# Altium footprint library FootPrintLib_9.PcbLib: 287 footprints (part 12 of 18)
Each footprint in its own frame and in the unit in brackets; x right, y up, seen from the top. Pads: shape width x height; smd on the part's side, far side on the other; paste and mask are expansions set on the pad; w line width, h text height; cw(c..) or ccw(c..) is an arc to the next point about the centre after c.
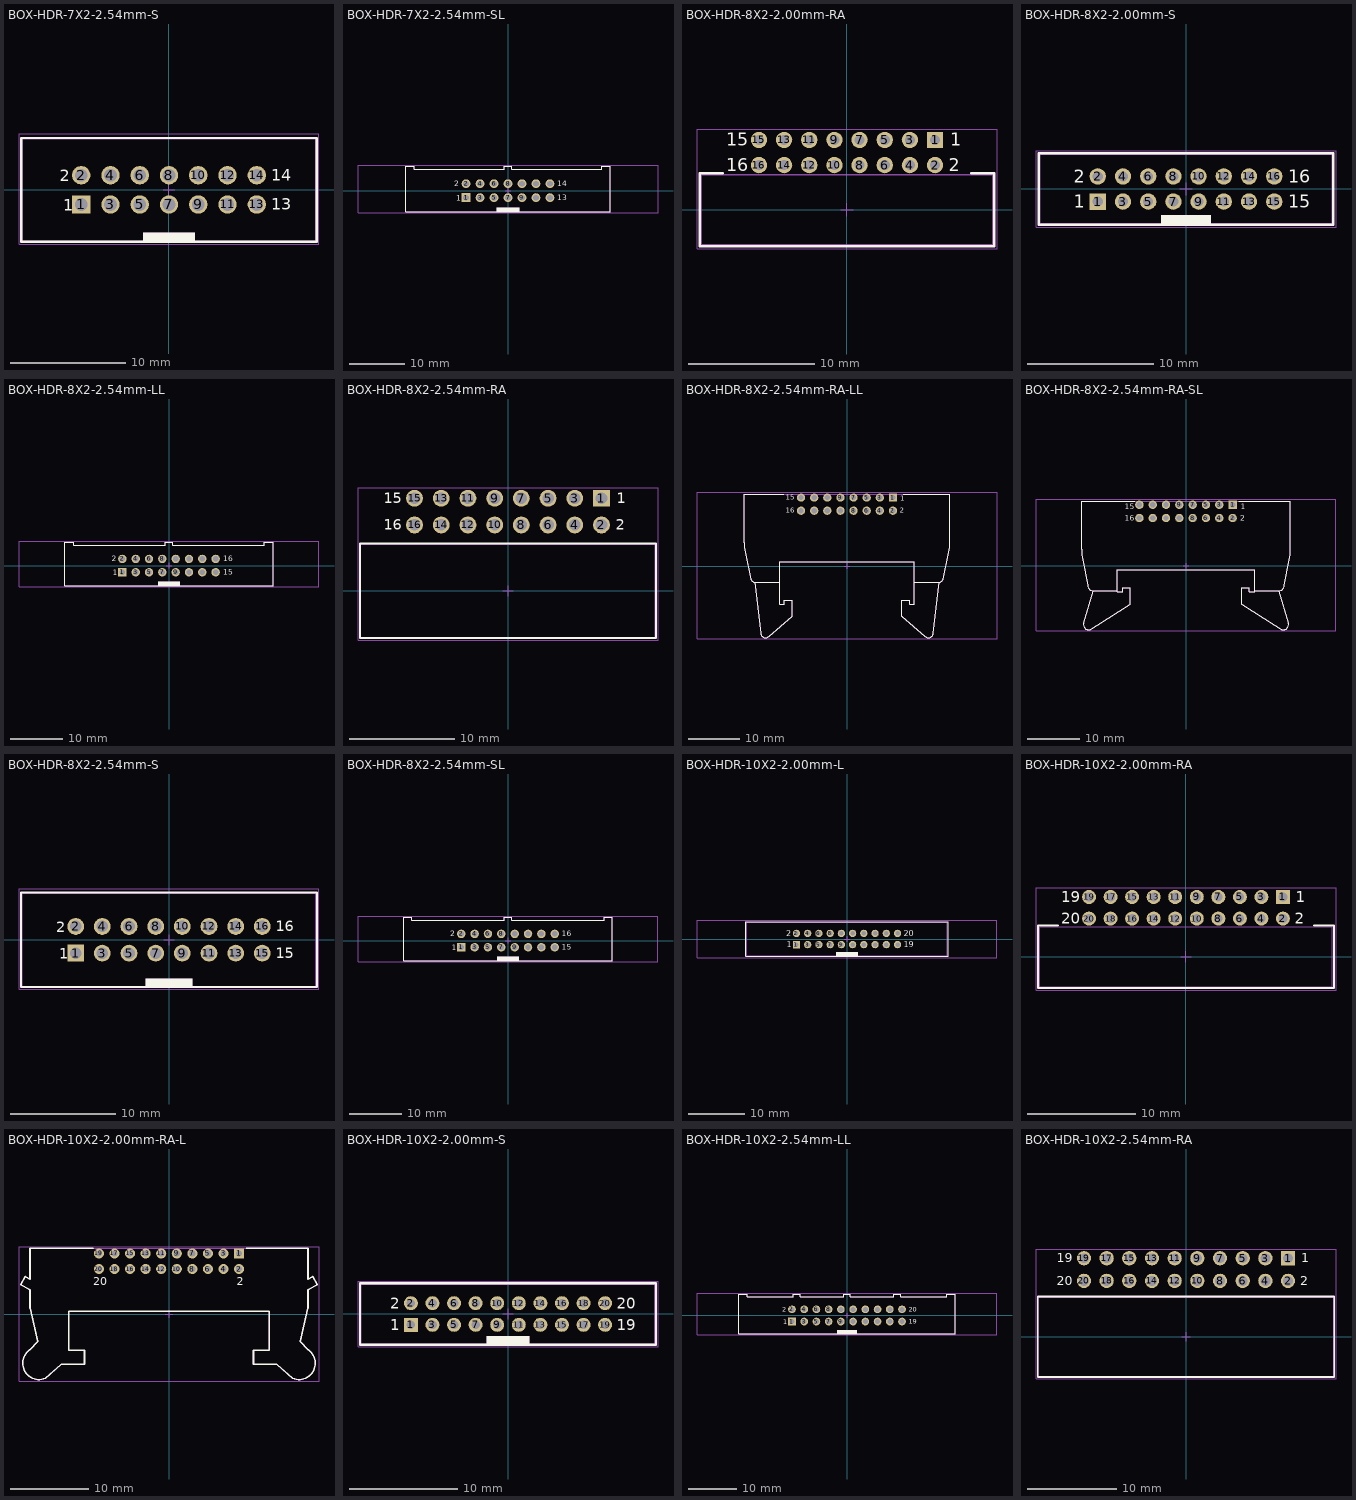
[diagram p11: the footprints below, top view; thin cyan lines are the x and y axes]

## BOX-HDR-7X2-2.54mm-S [mm] "14 pins, straight, gold plating"
height 9.1
pads (14):
  rect 1.6x1.6 hole 1.1: 1(-7.62,-1.27)
  round 1.6 hole 1.1: 2(-7.62,1.27) 3(-5.08,-1.27) 4(-5.08,1.27) 5(-2.54,-1.27) 6(-2.54,1.27) 7(0,-1.27) 8(0,1.27) 9(2.54,-1.27) 10(2.54,1.27) 11(5.08,-1.27) 12(5.08,1.27) 13(7.62,-1.27) 14(7.62,1.27)
Top Overlay:
  rectangle: -2.25,-4.5 2.25,-3.7
  lines w0.2: -12.82,-4.5 -12.82,4.5 12.82,4.5 12.82,-4.5 -12.82,-4.5
  text "14" at 8.88,0.8 h1.02
  text "13" at 8.88,-1.74 h1.02
  text "2" at -9.48,0.74 h1.02
  text "1" at -9.18,-1.8 h1.02
Mechanical 13:
  rectangle: -2.25,-4.425 2.25,-3.7
  lines w0.1: -12.72,-4.425 12.72,-4.425 12.72,4.425 -12.72,4.425 -12.72,-4.425
Mechanical 15:
  lines w0.05: -0.5,0 0.5,0 ; 0,-0.5 0,0.5 ; -13.02,-4.7 -13.02,4.85 13.02,4.85 13.02,-4.7 -13.02,-4.7
3D body "61201421621.stp": height 9.13, standoff -2.98, extent -12.72,-4.425 12.72,4.75

## BOX-HDR-7X2-2.54mm-SL [mm] "14 pins, straight, short lever, gold plating"
height 24.5
pads (14):
  rect 1.6x1.6 hole 1.02: 1(-7.62,-1.27)
  round 1.6 hole 1.02: 2(-7.62,1.27) 3(-5.08,-1.27) 4(-5.08,1.27) 5(-2.54,-1.27) 6(-2.54,1.27) 7(0,-1.27) 8(0,1.27) 9(2.54,-1.27) 10(2.54,1.27) 11(5.08,-1.27) 12(5.08,1.27) 13(7.62,-1.27) 14(7.62,1.27)
Top Overlay:
  rectangle: -2.1,-3.85 2.1,-3.05
  lines w0.2: -0.7,4.45 0.7,4.45 0.7,3.85 16.99,3.85 16.99,4.45 18.54,4.45 18.54,-3.85 -18.54,-3.85 -18.54,4.45 -16.99,4.45 -16.99,3.85 -0.7,3.85 -0.7,4.45 ; -0.7,4.45 -0.7,4.45
  text "14" at 8.94,0.8 h1.02
  text "13" at 8.94,-1.74 h1.02
  text "1" at -9.44,-1.8 h1.02
  text "2" at -9.74,0.8 h1.02
Mechanical 13:
  rectangle: -2.1,-3.85 2.1,-3.05
  lines w0.1: -0.7,4.45 -0.7,3.85 -16.99,3.85 -16.99,4.45 -18.54,4.45 -18.54,-3.85 18.54,-3.85 18.54,4.45 16.99,4.45 16.99,3.85 0.7,3.85 0.7,4.45 -0.7,4.45 ; -0.7,4.45 -0.7,4.45
Mechanical 15:
  lines w0.05: -0.5,0 0.5,0 ; 0,-0.5 0,0.5 ; -27.24,-4.05 27.24,-4.05 27.24,4.65 -27.24,4.65 -27.24,-4.05
3D body "61201422021.stp": height 24.55, standoff -3.35, extent -18.64,-3.85 18.641,4.45

## BOX-HDR-8X2-2.00mm-RA [mm] "2.00mm Male Angled Box Header, 16p"
height 5.4
pads (16):
  rect 1.3x1.3 hole 0.8: 1(7,5.55)
  round 1.3 hole 0.8: 2(7,3.55) 3(5,5.55) 4(5,3.55) 5(3,5.55) 6(3,3.55) 7(1,5.55) 8(1,3.55) 9(-1,5.55) 10(-1,3.55) 11(-3,5.55) 12(-3,3.55) 13(-5,5.55) 14(-5,3.55) 15(-7,5.55) 16(-7,3.55)
Top Overlay:
  lines w0.2: -9.875,2.9 -11.725,2.9 -11.725,-2.9 11.725,-2.9 11.725,2.9 9.875,2.9
  text "1" at 8.2,5.075 h1.02
  text "2" at 8.1,3.075 h1.02
  text "15" at -9.6,5.075 h1.02
  text "16" at -9.6,3.075 h1.02
Mechanical 13:
  lines w0.1: -11.6,-2.8 -11.6,2.8 11.6,2.8 11.6,-2.8 -11.6,-2.8
Mechanical 15:
  lines w0.05: -0.5,0 0.5,0 ; 0,-0.5 0,0.5 ; -11.925,-3.1 -11.925,6.4 11.925,6.4 11.925,-3.1 -11.925,-3.1
3D body "62501621721 (rev1).stp": height 5.5, standoff -2.85, extent -11.6,-2.8 11.6,5.8

## BOX-HDR-8X2-2.00mm-S [mm] "2.00mm Male Box Header, 16p"
height 5.6
pads (16):
  rect 1.3x1.3 hole 0.8: 1(-7,-1)
  round 1.3 hole 0.8: 2(-7,1) 3(-5,-1) 4(-5,1) 5(-3,-1) 6(-3,1) 7(-1,-1) 8(-1,1) 9(1,-1) 10(1,1) 11(3,-1) 12(3,1) 13(5,-1) 14(5,1) 15(7,-1) 16(7,1)
Top Overlay:
  rectangle: -2,-2.85 2,-2.05
  lines w0.2: -11.7,-2.85 11.7,-2.85 11.7,2.85 -11.7,2.85 -11.7,-2.85
  text "16" at 8.1,0.5 h1.02
  text "15" at 8.1,-1.5 h1.02
  text "1" at -8.9,-1.5 h1.02
  text "2" at -8.9,0.5 h1.02
Mechanical 13:
  rectangle: -2,-2.75 2,-2.05
  lines w0.1: -11.6,-2.75 -11.6,2.75 11.6,2.75 11.6,-2.75 -11.6,-2.75
Mechanical 15:
  lines w0.05: -0.5,0 0.5,0 ; 0,-0.5 0,0.5 ; -11.9,-3.05 -11.9,3.05 11.9,3.05 11.9,-3.05 -11.9,-3.05
3D body "62501621621.stp": height 5.65, standoff -2.5, extent -11.6,-2.75 11.6,2.75

## BOX-HDR-8X2-2.54mm-LL [mm] "16 pins, straight, long lever, gold plating"
height 28
pads (16):
  rect 1.6x1.6 hole 1.02: 1(-8.89,-1.27)
  round 1.6 hole 1.02: 2(-8.89,1.27) 3(-6.35,-1.27) 4(-6.35,1.27) 5(-3.81,-1.27) 6(-3.81,1.27) 7(-1.27,-1.27) 8(-1.27,1.27) 9(1.27,-1.27) 10(1.27,1.27) 11(3.81,-1.27) 12(3.81,1.27) 13(6.35,-1.27) 14(6.35,1.27) 15(8.89,-1.27) 16(8.89,1.27)
Top Overlay:
  rectangle: -2.1,-3.85 2.1,-3.04
  lines w0.2: -19.91,-3.85 19.91,-3.85 19.91,4.45 18.18,4.45 18.18,3.85 0.7,3.85 0.7,4.45 -0.7,4.45 -0.7,3.85 -18.18,3.85 -18.18,4.45 -19.91,4.45 -19.91,-3.85
  text "16" at 10.31,0.8 h1.02
  text "15" at 10.31,-1.74 h1.02
  text "1" at -10.71,-1.8 h1.02
  text "2" at -10.91,0.8 h1.02
Mechanical 13:
  rectangle: -2.1,-3.85 2.1,-3.04
  lines w0.1: -19.91,-3.85 -19.91,4.45 -18.18,4.45 -18.18,3.85 -0.7,3.85 -0.7,4.45 0.7,4.45 0.7,3.85 18.18,3.85 18.18,4.45 19.91,4.45 19.91,-3.85 -19.91,-3.85
Mechanical 15:
  lines w0.05: -0.5,0 0.5,0 ; 0,-0.5 0,0.5 ; -28.61,-4.05 28.61,-4.05 28.61,4.65 -28.61,4.65 -28.61,-4.05
3D body "61201622821 (rev1).stp": height 27.84, standoff -3.35, extent -19.91,-3.86 19.91,4.45

## BOX-HDR-8X2-2.54mm-RA [mm] "16 pins, right angled, gold plating"
height 9.1
pads (16):
  rect 1.6x1.6 hole 1.1: 1(8.89,8.805)
  round 1.6 hole 1.1: 2(8.89,6.265) 3(6.35,8.805) 4(6.35,6.265) 5(3.81,8.805) 6(3.81,6.265) 7(1.27,8.805) 8(1.27,6.265) 9(-1.27,8.805) 10(-1.27,6.265) 11(-3.81,8.805) 12(-3.81,6.265) 13(-6.35,8.805) 14(-6.35,6.265) 15(-8.89,8.805) 16(-8.89,6.265)
Top Overlay:
  lines w0.2: -14.065,-4.5 14.065,-4.5 14.065,4.5 -14.065,4.5 -14.065,-4.5
  text "16" at -11.81,5.8 h1.02
  text "15" at -11.81,8.34 h1.02
  text "1" at 10.35,8.34 h1.02
  text "2" at 10.25,5.8 h1.02
Mechanical 13:
  lines w0.1: -13.99,-4.425 13.99,-4.425 13.99,4.425 -13.99,4.425 -13.99,-4.425
Mechanical 15:
  lines w0.05: -0.5,0 0.5,0 ; 0,-0.5 0,0.5 ; -14.265,-4.7 -14.265,9.805 14.265,9.805 14.265,-4.7 -14.265,-4.7
3D body "61201621721.stp": height 9.23, standoff -2.88, extent -13.99,-4.425 13.99,9.125

## BOX-HDR-8X2-2.54mm-RA-LL [mm] "16 pins, right angeled, long lever, gold plating"
height 10.8
pads (16):
  rect 1.6x1.6 hole 1.02: 1(8.89,13.23)
  round 1.6 hole 1.02: 2(8.89,10.69) 3(6.35,13.23) 4(6.35,10.69) 5(3.81,13.23) 6(3.81,10.69) 7(1.27,13.23) 8(1.27,10.69) 9(-1.27,13.23) 10(-1.27,10.69) 11(-3.81,13.23) 12(-3.81,10.69) 13(-6.35,13.23) 14(-6.35,10.69) 15(-8.89,13.23) 16(-8.89,10.69)
Top Overlay:
  lines w0.2: -19.91,4.54 -19.91,13.85 -12.21,13.85 ; -19.905,4.54 ccw(c-9.91,4.84) -19.664,2.636 -18.619,-2.534 ; -18.613,-2.533 ccw(c-17.69,-2.15) -17.69,-3.15 -13.01,-3.15 ; -17.874,-3.15 -16.728,-13.022 ccw(c-15.74,-12.87) -15.082,-13.623 -10.611,-9.758 ; -10.61,-9.76 -10.61,-6.66 -12.11,-6.66 -12.11,-7.37 -13.01,-7.37 -13.01,0.85 13.01,0.85 13.01,-7.37 12.11,-7.37 12.11,-6.66 10.61,-6.66 10.61,-9.76 ; 10.611,-9.758 15.083,-13.623 ccw(c15.74,-12.87) 16.728,-13.022 17.874,-3.15 ; 10.86,13.85 19.91,13.85 19.91,4.54 ; 13.01,-3.15 17.69,-3.15 ccw(c17.69,-2.15) 18.614,-2.533 ; 18.619,-2.534 19.664,2.636 ccw(c9.91,4.84) 19.906,4.54
  text "1" at 10.31,12.66 h1.02
  text "2" at 10.21,10.26 h1.02
  text "16" at -11.81,10.26 h1.02
  text "15" at -11.81,12.8 h1.02
Mechanical 13:
  lines w0.1: -19.91,4.54 -19.91,13.85 19.91,13.85 19.91,4.54 ; -19.905,4.54 ccw(c-9.91,4.84) -19.664,2.636 -18.619,-2.534 ; -18.613,-2.533 ccw(c-17.69,-2.15) -17.69,-3.15 -13.01,-3.15 ; -17.874,-3.15 -16.728,-13.022 ccw(c-15.74,-12.87) -15.082,-13.623 -10.611,-9.758 ; -10.61,-9.76 -10.61,-6.66 -12.11,-6.66 -12.11,-7.37 -13.01,-7.37 -13.01,0.85 13.01,0.85 13.01,-7.37 12.11,-7.37 12.11,-6.66 10.61,-6.66 10.61,-9.76 ; 10.611,-9.758 15.083,-13.623 ccw(c15.74,-12.87) 16.728,-13.022 17.874,-3.15 ; 13.01,-3.15 17.69,-3.15 ccw(c17.69,-2.15) 18.614,-2.533 ; 18.619,-2.534 19.664,2.636 ccw(c9.91,4.84) 19.906,4.54
Mechanical 15:
  lines w0.05: -0.5,0 0.5,0 ; 0,-0.5 0,0.5 ; -29.01,-14.06 -29.01,14.23 29.01,14.23 29.01,-14.06 -29.01,-14.06
3D body "61201622921 (rev1).stp": height 8.35, standoff -2.35, extent -19.91,-13.871 19.91,13.85

## BOX-HDR-8X2-2.54mm-RA-SL [mm] "16 pins, right angeled, short lever, gold plating"
height 8.3
pads (16):
  rect 1.6x1.6 hole 1.02: 1(8.89,11.63)
  round 1.6 hole 1.02: 2(8.89,9.09) 3(6.35,11.63) 4(6.35,9.09) 5(3.81,11.63) 6(3.81,9.09) 7(1.27,11.63) 8(1.27,9.09) 9(-1.27,11.63) 10(-1.27,9.09) 11(-3.81,11.63) 12(-3.81,9.09) 13(-6.35,11.63) 14(-6.35,9.09) 15(-8.89,11.63) 16(-8.89,9.09)
Top Overlay:
  lines w0.2: -18.774,-3.751 -19.716,1.138 cw(c-9.91,3.1) -19.91,3.1 -19.91,12.25 -9.81,12.25 ; -18.77,-3.75 ccw(c-17.77,-3.75) -17.77,-4.75 ; -17.865,-4.75 -13.11,-4.75 ; -17.684,-4.851 -19.517,-10.941 ccw(c-18.56,-11.23) -18.01,-12.066 -10.61,-7.33 -10.61,-4.23 -12.11,-4.23 -12.11,-4.94 -13.11,-4.94 -13.11,-0.75 13.11,-0.75 13.11,-4.94 12.11,-4.94 12.11,-4.23 10.61,-4.23 10.61,-7.33 18.01,-12.067 ccw(c18.56,-11.23) 19.517,-10.941 17.684,-4.851 ; 10.06,12.25 19.91,12.25 19.91,3.1 cw(c9.91,3.1) 19.716,1.138 18.774,-3.751 ; 13.11,-4.75 17.865,-4.75 ; 17.77,-4.75 ccw(c17.77,-3.75) 18.77,-3.75
  text "2" at 10.31,8.6 h1.02
  text "1" at 10.41,10.8 h1.02
  text "16" at -11.71,8.6 h1.02
  text "15" at -11.71,10.8 h1.02
Mechanical 13:
  lines w0.1: -18.774,-3.751 -19.716,1.138 cw(c-9.91,3.1) -19.91,3.1 -19.91,12.25 19.91,12.25 19.91,3.1 cw(c9.91,3.1) 19.716,1.138 18.774,-3.751 ; -18.77,-3.75 ccw(c-17.77,-3.75) -17.77,-4.75 ; -17.865,-4.75 -13.11,-4.75 ; -17.684,-4.851 -19.517,-10.941 ccw(c-18.56,-11.23) -18.01,-12.066 -10.61,-7.33 -10.61,-4.23 -12.11,-4.23 -12.11,-4.94 -13.11,-4.94 -13.11,-0.75 13.11,-0.75 13.11,-4.94 12.11,-4.94 12.11,-4.23 10.61,-4.23 10.61,-7.33 18.01,-12.067 ccw(c18.56,-11.23) 19.517,-10.941 17.684,-4.851 ; 13.11,-4.75 17.865,-4.75 ; 17.77,-4.75 ccw(c17.77,-3.75) 18.77,-3.75
Mechanical 15:
  lines w0.05: -0.5,0 0.5,0 ; 0,-0.5 0,0.5 ; -28.61,-12.45 28.61,-12.45 28.61,12.63 -28.61,12.63 -28.61,-12.45
3D body "61201622121.stp": height 8.35, standoff -3.35, extent -19.91,-12.25 19.91,12.25

## BOX-HDR-8X2-2.54mm-S [mm] "16 pins, straight, gold plating"
height 9.1
pads (16):
  rect 1.6x1.6 hole 1.1: 1(-8.89,-1.27)
  round 1.6 hole 1.1: 2(-8.89,1.27) 3(-6.35,-1.27) 4(-6.35,1.27) 5(-3.81,-1.27) 6(-3.81,1.27) 7(-1.27,-1.27) 8(-1.27,1.27) 9(1.27,-1.27) 10(1.27,1.27) 11(3.81,-1.27) 12(3.81,1.27) 13(6.35,-1.27) 14(6.35,1.27) 15(8.89,-1.27) 16(8.89,1.27)
Top Overlay:
  rectangle: -2.25,-4.5 2.25,-3.7
  lines w0.2: -14.09,-4.5 14.09,-4.5 14.09,4.5 -14.09,4.5 -14.09,-4.5
  text "1" at -10.45,-1.8 h1.02
  text "2" at -10.75,0.74 h1.02
  text "16" at 10.15,0.8 h1.02
  text "15" at 10.15,-1.74 h1.02
Mechanical 13:
  rectangle: -2.25,-4.425 2.25,-3.7
  lines w0.1: -13.99,-4.425 -13.99,4.425 13.99,4.425 13.99,-4.425 -13.99,-4.425
Mechanical 15:
  lines w0.05: -0.5,0 0.5,0 ; 0,-0.5 0,0.5 ; -14.29,-4.7 14.29,-4.7 14.29,4.85 -14.29,4.85 -14.29,-4.7
3D body "61201621621.stp": height 9.13, standoff -2.98, extent -13.99,-4.425 13.99,4.75

## BOX-HDR-8X2-2.54mm-SL [mm] "16 pins, straight, short lever, gold plating"
height 24.5
pads (16):
  rect 1.6x1.6 hole 1.02: 1(-8.89,-1.27)
  round 1.6 hole 1.02: 2(-8.89,1.27) 3(-6.35,-1.27) 4(-6.35,1.27) 5(-3.81,-1.27) 6(-3.81,1.27) 7(-1.27,-1.27) 8(-1.27,1.27) 9(1.27,-1.27) 10(1.27,1.27) 11(3.81,-1.27) 12(3.81,1.27) 13(6.35,-1.27) 14(6.35,1.27) 15(8.89,-1.27) 16(8.89,1.27)
Top Overlay:
  rectangle: -2.1,-3.85 2.1,-3.05
  lines w0.2: -0.7,4.45 -0.7,3.85 -18.26,3.85 -18.26,4.45 -19.81,4.45 -19.81,-3.85 19.81,-3.85 19.81,4.45 18.26,4.45 18.26,3.85 0.7,3.85 0.7,4.45 -0.7,4.45 ; -0.7,4.45 -0.7,4.45
  text "1" at -10.71,-1.8 h1.02
  text "2" at -11.01,0.8 h1.02
  text "15" at 10.21,-1.74 h1.02
  text "16" at 10.21,0.8 h1.02
Mechanical 13:
  rectangle: -2.1,-3.85 2.1,-3.05
  lines w0.1: -0.7,4.45 0.7,4.45 0.7,3.85 18.26,3.85 18.26,4.45 19.81,4.45 19.81,-3.85 -19.81,-3.85 -19.81,4.45 -18.26,4.45 -18.26,3.85 -0.7,3.85 -0.7,4.45 ; -0.7,4.45 -0.7,4.45
Mechanical 15:
  lines w0.05: -0.5,0 0.5,0 ; 0,-0.5 0,0.5 ; -28.51,-4.05 28.51,-4.05 28.51,4.65 -28.51,4.65 -28.51,-4.05
3D body "61201622021.stp": height 24.55, standoff -3.35, extent -19.91,-3.85 19.911,4.45

## BOX-HDR-10X2-2.00mm-L [mm] "2.00mm Male Box Header with Lever, 20p"
height 16.85
pads (20):
  rect 1.3x1.3 hole 0.8: 1(-9,-1)
  round 1.3 hole 0.8: 2(-9,1) 3(-7,-1) 4(-7,1) 5(-5,-1) 6(-5,1) 7(-3,-1) 8(-3,1) 9(-1,-1) 10(-1,1) 11(1,-1) 12(1,1) 13(3,-1) 14(3,1) 15(5,-1) 16(5,1) 17(7,-1) 18(7,1) 19(9,-1) 20(9,1)
Top Overlay:
  rectangle: -2,-3.1 2,-2.3
  lines w0.2: -18,-3.1 18,-3.1 18,3.1 -18,3.1 -18,-3.1
  text "20" at 10.1,0.5 h1.02
  text "19" at 10.1,-1.5 h1.02
  text "2" at -10.8,0.5 h1.02
  text "1" at -10.7,-1.5 h1.02
Mechanical 13:
  rectangle: -2,-3 2,-2.3
  lines w0.1: -17.85,-3 17.85,-3 17.85,3 -17.85,3 -17.85,-3
Mechanical 15:
  lines w0.05: -0.5,0 0.5,0 ; 0,-0.5 0,0.5 ; -26.7,-3.3 -26.7,3.3 26.7,3.3 26.7,-3.3 -26.7,-3.3
3D body "62502022021.stp": height 16.9, standoff -2.95, extent -19.062,-3 19.063,3

## BOX-HDR-10X2-2.00mm-RA [mm] "2.00mm Male Angled Box Header, 20p"
height 5.4
pads (20):
  rect 1.3x1.3 hole 0.8: 1(9,5.55)
  round 1.3 hole 0.8: 2(9,3.55) 3(7,5.55) 4(7,3.55) 5(5,5.55) 6(5,3.55) 7(3,5.55) 8(3,3.55) 9(1,5.55) 10(1,3.55) 11(-1,5.55) 12(-1,3.55) 13(-3,5.55) 14(-3,3.55) 15(-5,5.55) 16(-5,3.55) 17(-7,5.55) 18(-7,3.55) 19(-9,5.55) 20(-9,3.55)
Top Overlay:
  lines w0.2: -11.875,2.9 -13.725,2.9 -13.725,-2.9 13.725,-2.9 13.725,2.9 11.875,2.9
  text "20" at -11.6,3.075 h1.02
  text "19" at -11.6,5.075 h1.02
  text "2" at 10.1,3.075 h1.02
  text "1" at 10.2,5.075 h1.02
Mechanical 13:
  lines w0.1: -13.6,-2.8 13.6,-2.8 13.6,2.8 -13.6,2.8 -13.6,-2.8
Mechanical 15:
  lines w0.05: -0.5,0 0.5,0 ; 0,-0.5 0,0.5 ; -13.925,-3.1 13.925,-3.1 13.925,6.4 -13.925,6.4 -13.925,-3.1
3D body "62502021721 (rev1).stp": height 5.5, standoff -2.85, extent -13.6,-2.8 13.6,5.8

## BOX-HDR-10X2-2.00mm-RA-L [mm] "2.00mm Male Angled Box Header with Lever, 20p"
height 3.15
pads (20):
  rect 1.3x1.3 hole 0.8: 1(9,7.775)
  round 1.3 hole 0.8: 2(9,5.775) 3(7,7.775) 4(7,5.775) 5(5,7.775) 6(5,5.775) 7(3,7.775) 8(3,5.775) 9(1,7.775) 10(1,5.775) 11(-1,7.775) 12(-1,5.775) 13(-3,7.775) 14(-3,5.775) 15(-5,7.775) 16(-5,5.775) 17(-7,7.775) 18(-7,5.775) 19(-9,7.775) 20(-9,5.775)
Top Overlay:
  lines w0.2: -18.466,4.813 -19.06,3.785 -17.851,3.087 -17.851,0.753 ; -18.46,4.815 -17.848,4.462 ; -17.894,-4.611 ccw(c-16.68,-6.325) -15.865,-8.26 ; -17.892,-4.613 -16.85,-3.535 -17.837,0.738 ; -17.85,4.464 -17.85,8.425 -9.75,8.425 ; -15.866,-8.259 -13.85,-6.475 -10.85,-6.475 -10.85,-4.675 -12.85,-4.675 -12.85,0.325 12.85,0.325 12.85,-4.675 10.85,-4.675 10.85,-6.475 13.85,-6.475 15.866,-8.259 ; 9.95,8.425 17.85,8.425 17.85,4.464 ; 15.865,-8.26 ccw(c16.68,-6.325) 17.894,-4.611 ; 17.837,0.738 16.85,-3.535 17.892,-4.613 ; 17.848,4.462 18.46,4.815 ; 17.851,0.753 17.851,3.087 19.06,3.785 18.466,4.813
  text "2" at 8.7,3.675 h1.02
  text "20" at -9.7,3.675 h1.02
Mechanical 13:
  lines w0.1: -18.466,4.813 -19.06,3.785 -17.851,3.087 -17.851,0.753 ; -18.46,4.815 -17.848,4.462 ; -17.894,-4.611 ccw(c-16.68,-6.325) -15.865,-8.26 ; -17.892,-4.613 -16.85,-3.535 -17.837,0.738 ; -17.85,4.464 -17.85,8.425 17.85,8.425 ; -15.866,-8.259 -13.85,-6.475 -10.85,-6.475 -10.85,-4.675 -12.85,-4.675 -12.85,0.325 12.85,0.325 12.85,-4.675 10.85,-4.675 10.85,-6.475 13.85,-6.475 15.866,-8.259 ; 15.865,-8.26 ccw(c16.68,-6.325) 17.894,-4.611 ; 17.837,0.738 16.85,-3.535 17.892,-4.613 ; 17.848,4.462 18.46,4.815 ; 17.848,8.423 17.85,8.425 ; 17.85,4.464 17.85,8.425 ; 17.851,0.753 17.851,3.087 19.06,3.785 18.466,4.813
Mechanical 15:
  lines w0.05: -0.5,0 0.5,0 ; 0,-0.5 0,0.5 ; -19.262,-8.625 19.262,-8.625 19.262,8.625 -19.262,8.625 -19.262,-8.625
3D body "62502022121.stp": height 6.1, standoff -3.05, extent -19.062,-8.425 19.062,8.425

## BOX-HDR-10X2-2.00mm-S [mm] "2.00mm Male Box Header, 20p"
height 5.6
pads (20):
  rect 1.3x1.3 hole 0.8: 1(-9,-1)
  round 1.3 hole 0.8: 2(-9,1) 3(-7,-1) 4(-7,1) 5(-5,-1) 6(-5,1) 7(-3,-1) 8(-3,1) 9(-1,-1) 10(-1,1) 11(1,-1) 12(1,1) 13(3,-1) 14(3,1) 15(5,-1) 16(5,1) 17(7,-1) 18(7,1) 19(9,-1) 20(9,1)
Top Overlay:
  rectangle: -2,-2.85 2,-2.05
  lines w0.2: -13.7,-2.85 13.7,-2.85 13.7,2.85 -13.7,2.85 -13.7,-2.85
  text "19" at 10.1,-1.5 h1.02
  text "20" at 10.1,0.5 h1.02
  text "1" at -10.9,-1.5 h1.02
  text "2" at -10.9,0.5 h1.02
Mechanical 13:
  rectangle: -2,-2.75 2,-2.05
  lines w0.1: -13.6,-2.75 -13.6,2.75 13.6,2.75 13.6,-2.75 -13.6,-2.75
Mechanical 15:
  lines w0.05: -0.5,0 0.5,0 ; 0,-0.5 0,0.5 ; -13.9,-3.05 -13.9,3.05 13.9,3.05 13.9,-3.05 -13.9,-3.05
3D body "62502021621.stp": height 5.65, standoff -2.5, extent -13.6,-2.75 13.6,2.75

## BOX-HDR-10X2-2.54mm-LL [mm] "20 pins, straight, long lever, gold plating"
height 28
pads (20):
  rect 1.6x1.6 hole 1.02: 1(-11.43,-1.27)
  round 1.6 hole 1.02: 2(-11.43,1.27) 3(-8.89,-1.27) 4(-8.89,1.27) 5(-6.35,-1.27) 6(-6.35,1.27) 7(-3.81,-1.27) 8(-3.81,1.27) 9(-1.27,-1.27) 10(-1.27,1.27) 11(1.27,-1.27) 12(1.27,1.27) 13(3.81,-1.27) 14(3.81,1.27) 15(6.35,-1.27) 16(6.35,1.27) 17(8.89,-1.27) 18(8.89,1.27) 19(11.43,-1.27) 20(11.43,1.27)
Top Overlay:
  rectangle: -2.1,-3.85 2.1,-3.04
  lines w0.2: -22.45,-3.85 -22.45,4.45 -20.72,4.45 -20.72,3.85 -11.15,3.85 -11.15,4.45 -9.75,4.45 -9.75,3.85 -0.7,3.85 -0.7,4.45 0.7,4.45 0.7,3.85 9.75,3.85 9.75,4.45 11.15,4.45 11.15,3.85 20.72,3.85 20.72,4.45 22.45,4.45 22.45,-3.85 -22.45,-3.85
  text "19" at 12.85,-1.74 h1.02
  text "20" at 12.85,0.8 h1.02
  text "1" at -13.25,-1.8 h1.02
  text "2" at -13.45,0.8 h1.02
Mechanical 13:
  rectangle: -2.1,-3.85 2.1,-3.04
  lines w0.1: -22.45,-3.85 22.45,-3.85 22.45,4.45 20.72,4.45 20.72,3.85 11.15,3.85 11.15,4.45 9.75,4.45 9.75,3.85 0.7,3.85 0.7,4.45 -0.7,4.45 -0.7,3.85 -9.75,3.85 -9.75,4.45 -11.15,4.45 -11.15,3.85 -20.72,3.85 -20.72,4.45 -22.45,4.45 -22.45,-3.85
Mechanical 15:
  lines w0.05: -0.5,0 0.5,0 ; 0,-0.5 0,0.5 ; -31.15,-4.05 31.15,-4.05 31.15,4.65 -31.15,4.65 -31.15,-4.05
3D body "61202022821 (rev1).stp": height 27.84, standoff -3.35, extent -22.45,-3.86 22.45,4.45

## BOX-HDR-10X2-2.54mm-RA [mm] "20 pins, right angled, gold plating"
height 9.1
pads (20):
  rect 1.6x1.6 hole 1.1: 1(11.43,8.805)
  round 1.6 hole 1.1: 2(11.43,6.265) 3(8.89,8.805) 4(8.89,6.265) 5(6.35,8.805) 6(6.35,6.265) 7(3.81,8.805) 8(3.81,6.265) 9(1.27,8.805) 10(1.27,6.265) 11(-1.27,8.805) 12(-1.27,6.265) 13(-3.81,8.805) 14(-3.81,6.265) 15(-6.35,8.805) 16(-6.35,6.265) 17(-8.89,8.805) 18(-8.89,6.265) 19(-11.43,8.805) 20(-11.43,6.265)
Top Overlay:
  lines w0.2: -16.605,-4.5 16.605,-4.5 16.605,4.5 -16.605,4.5 -16.605,-4.5
  text "1" at 12.89,8.34 h1.02
  text "2" at 12.79,5.8 h1.02
  text "19" at -14.5,8.34 h1.02
  text "20" at -14.5,5.8 h1.02
Mechanical 13:
  lines w0.1: -16.53,-4.425 16.53,-4.425 16.53,4.425 -16.53,4.425 -16.53,-4.425
Mechanical 15:
  lines w0.05: -0.5,0 0.5,0 ; 0,-0.5 0,0.5 ; -16.805,-4.7 -16.805,9.805 16.805,9.805 16.805,-4.7 -16.805,-4.7
3D body "61202021721.stp": height 9.23, standoff -2.88, extent -16.53,-4.425 16.53,9.125